# Altium footprint library CONN_SD-39773-001_04P_MOL.PcbLib: 1 footprints
Each footprint in its own frame and in the unit in brackets; x right, y up, seen from the top. Pads: shape width x height; smd on the part's side, far side on the other; paste and mask are expansions set on the pad; w line width, h text height; cw(c..) or ccw(c..) is an arc to the next point about the centre after c.
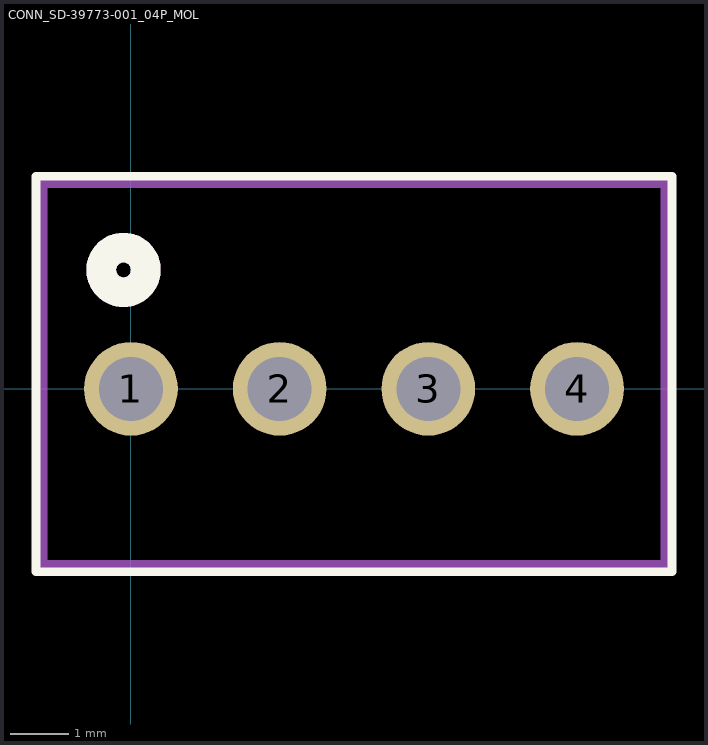
[diagram p0: the footprint, top view; thin cyan lines are the x and y axes]

## CONN_SD-39773-001_04P_MOL [mil]
pads (4):
  round 63 hole 43 mask+4.02: 1(0,0) 2(100,0) 3(200,0) 4(300,0)
Top Overlay:
  lines w6: -64,-123 -64,143 364,143 364,-123 -64,-123
  lines w20: -20,80 cw(c-5,80) 10,80 cw(c-5,80) -20,80
Bottom Overlay:
  lines w20: -20,80 ccw(c-5,80) 10,80 ccw(c-5,80) -20,80
Assembly Top:
  lines w6: -59,-118 -59,138 359,138 359,-118 -59,-118
  lines w20: -20,80 cw(c-5,80) 10,80 cw(c-5,80) -20,80
3D body "397730002.stp": height 394, standoff -134, extent -69,-115 149,141
3D body "397730002.stp": height 394, standoff -134, extent 151,-115 369,141